# Altium footprint library cap-ae-d10-h12.4-av.PcbLib: 1 footprints
Each footprint in its own frame and in the unit in brackets; x right, y up, seen from the top. Pads: shape width x height; smd on the part's side, far side on the other; paste and mask are expansions set on the pad; w line width, h text height; cw(c..) or ccw(c..) is an arc to the next point about the centre after c.
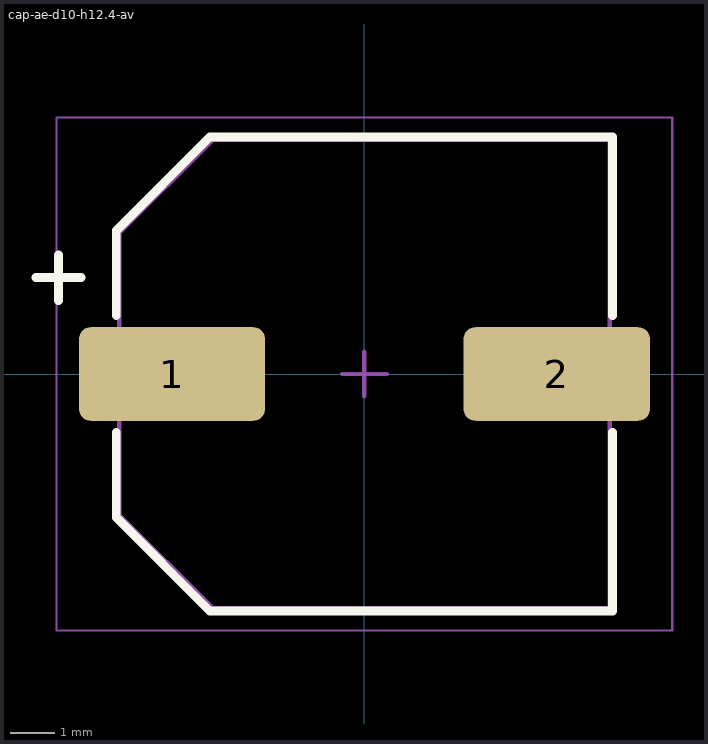
[diagram p0: the footprint, top view; thin cyan lines are the x and y axes]

## cap-ae-d10-h12.4-av [mm] "Aluminium electrolytic/polymer V-chip, D10 x H12.4, anti-vibration (KEMET MS-AV), body 10.80x10.30x12.90 mm max, pads per KEMET A786 datasheet"
height 12.9
pads (2):
  rrect25% 4.175x2.1 smd: 1(-4.313,0) 2(4.312,0)
Top Overlay:
  lines w0.2: -7.366,2.159 -6.35,2.159 ; -6.858,1.651 -6.858,2.667 ; -5.564,-1.314 -5.564,-3.213 -3.464,-5.313 5.563,-5.313 5.563,-1.314 ; -5.564,1.314 -5.564,3.214 -3.464,5.313 5.563,5.313 5.563,1.314
Mechanical 13:
  lines w0.1: -5.5,-3.15 -3.4,-5.25 5.5,-5.25 5.5,5.25 -3.4,5.25 -5.5,3.15 -5.5,-3.15
Mechanical 15:
  lines w0.05: -6.9,-5.75 -6.9,5.75 6.9,5.75 6.9,-5.75 -6.9,-5.75
  lines w0.1: -0.5,0 0.5,0 ; 0,-0.5 0,0.5
3D body "cap-ae-d10-h12.4-av.step": height 13.24, standoff 0, extent -5.6,-5.238 5.6,5.238